# Altium integrated library a4402-ELE-CAD.IntLib: 46 symbols (part 1 of 2)
Pins are listed as number, name and electrical type; pins without a type are passive.

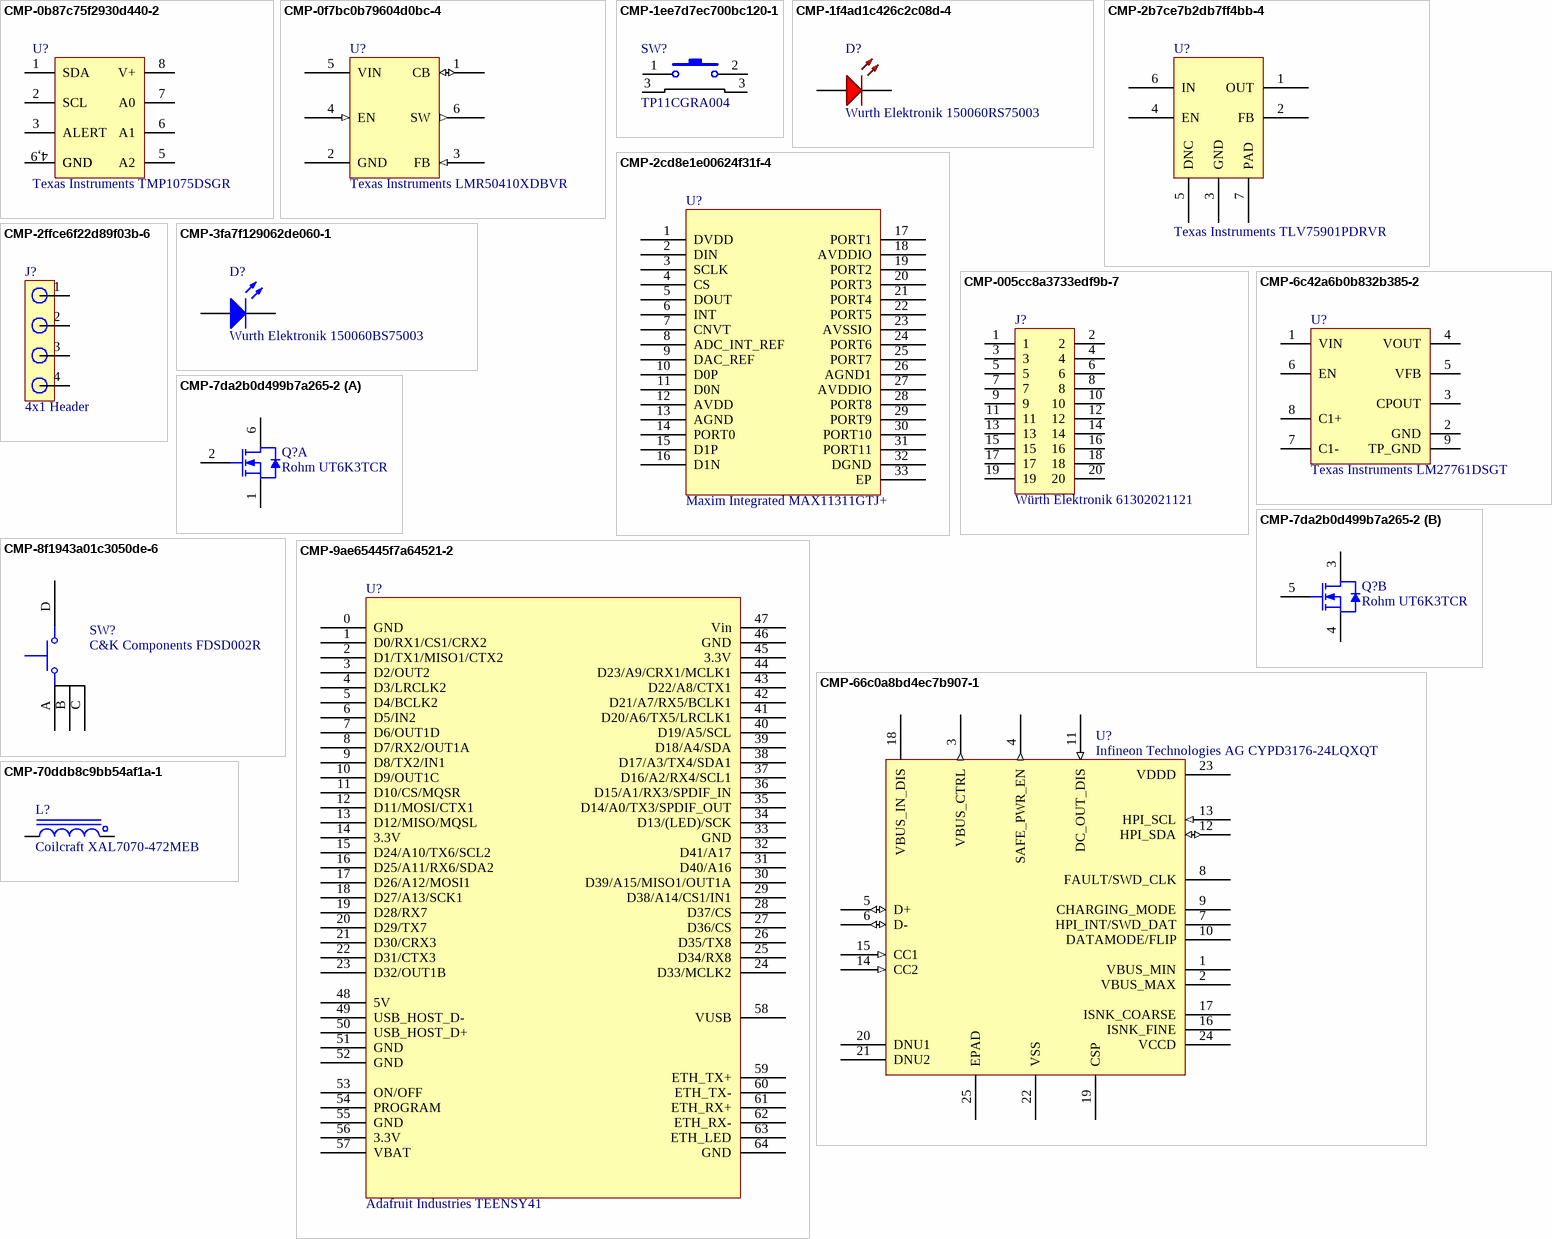
[diagram p0: symbols CMP-0b87c75f2930d440-2 to CMP-70ddb8c9bb54af1a-1]

## CMP-0b87c75f2930d440-2
designator U?, comment Texas Instruments TMP1075DSGR
High-accuracy upgrade to industry standard LM75 / TMP75 I2C temperature sensor 8-WSON -55 to 125; Case/Package: WSON; Footprint: PCB-22psa42mhiow8cw0mt2a-1; RoHS: Compliant; Octopart URL: https://octopart.com/tmp1075dsgr-texas+instruments-97650641; Lifecycle Status: Pre-Release; Manufacturer Part Number: TMP1075DSGR; OctopartID: 0b87c75f2930d440; Number of Pins: 8
footprint PCB-22psa42mhiow8cw0mt2a-1 (Footprint - Texas Instruments TMP1075DSGR)
pins: 1 SDA, 2 SCL, 3 ALERT, 4 GND (power), 5 A2, 6 A1, 7 A0, 8 V+ (power) "1.7...5.5V", 9 GND (power)
text: 4,9

## CMP-0f7bc0b79604d0bc-4
designator U?, comment Texas Instruments LMR50410XDBVR
SIMPLE SWITCHER 4-V to 36-V, 1-A synchronous step-down converter 6-SOT-23 -40 to 150; Number of Outputs: 1; Switching Frequency: 700kHz (typ); Topology: Buck Converter; Output Current: 1.0A; Lead-Free Status: Lead Free; Input Voltage: 4.0V to 36.0V; Output Voltage: Adjustable (SW to GND: -0.3V to VIN+0.3V); case/package: SOT-23-6 DBV Package; Number of Pins: 6; Mounting Style: Surface Mount; Manufacturer Part Number: LMR50410XDBVR; Operating Temperature (Junction): -40°C to 150°C; Octopart URL: https://octopart.com/lmr50410xdbvr-texas+instruments-113687577; OctopartID: 0f7bc0b79604d0bc; Footprint: PCB-b726so6zuq7w9f75ocqz-1; Lifecycle Status: Not Listed by Manufacturer
footprint PCB-b726so6zuq7w9f75ocqz-1 (Footprint - Texas Instruments LMR50410XDBVR)
pins: 1 CB (io), 2 GND (power), 3 FB (in), 4 EN (in), 5 VIN (power), 6 SW (out)

## CMP-1ee7d7ec700bc120-1
designator SW?, comment TP11CGRA004
Switch, Pushbutton, Thru-Hole Mount, SPST, PC Mount, 1000 V (RMS) (Min.); Contact Resistance: 20.0 mΩ (max); ELV Compliant: Non-Compliant; Lead-Free Status: Contains Lead; Size-Width: 5.08 mm; Octopart URL: https://octopart.com/tp11cgra0-te+connectivity+%2F+alcoswitch-84874; Lifecycle Status: Active; Contacts Type: SPST; OctopartID: 1ee7d7ec700bc120; RoHS: Non-Compliant; Packaging: Bulk; Footprint: PCB-kxc5zoxy62rh6gxl0cji-1; Orientation: Right Angle; Size-Length: 8.13 mm; Manufacturer Part Number: TP11CGRA004; Contact Plating: Gold over Nickel; Operating Temperature: 65.0 °C (max); Contact Material: Copper Alloy; Mounting Style: Through Hole
footprint PCB-kxc5zoxy62rh6gxl0cji-1 (Footprint - TE Connectivity / Alcoswitch TP11CGRA0)
pins: 1, 2, 3, 3

## CMP-1f4ad1c426c2c08d-4
designator D?, comment Wurth Elektronik 150060RS75003
SMT Mono-color Chip Led Watercle; OctopartID: 1f4ad1c426c2c08d; Manufacturer Part Number: 150060RS75003; Octopart Url: https://octopart.com/150060rs75003-wurth+elektronik-126098670
footprint Wurth Elektronik 150060RS75003-Footprint-1
pins: 1 A, 2 K

## CMP-2b7ce7b2db7ff4bb-4
designator U?, comment Texas Instruments TLV75901PDRVR
LDO Regulator Pos 0.55V to 5.5V 1A 6-Pin WSON EP T/R; Dropout Voltage: 190 mV; Number of Regulated Outputs: 1; Output Capacitor Type: Ceramic; Quiescent Current: 25.0 µA; OctopartID: 2b7ce7b2db7ff4bb; Manufacturer Part Number: TLV75901PDRVR; Footprint: PCB-6kp9dl1mk9yrlugndkjx-1; RoHS: Compliant; Octopart URL: https://octopart.com/tlv75901pdrvr-texas+instruments-96785765; Number of Pins: 6; Lifecycle Status: Pre-Release; Case/Package: WSON; Operating Temperature: -40.0 °C to 125 °C
footprint PCB-ude52gq66msu1251nhm5-1 (Texas Intrusment LP5912 - 6Pin SON (Small Outline No-lead))
pins: 1 OUT, 2 FB, 3 GND, 4 EN, 5 DNC, 6 IN, 7 PAD

## CMP-2cd8e1e00624f31f-4
designator U?, comment Maxim Integrated MAX11311GTJ+
12-channel 12-Bit ADC and 12-Bit DAC, Analog PIXI, 12-Port Programmable Mixed-Signal I/O; Channels: 12; Lead-Free Status: Lead Free; Sample Rate: 400 kHz; Range Options: 0 to 2.5V, ±5V, 0 to +10V, -10V; Supply Voltage (DC): 4.75 V (max), 5.25 V (min); Manufacturer Part Number: MAX11311GTJ+; Lifecycle Status: Not Listed by Manufacturer; Octopart URL: http://octopart.com/max11311gtj%2B-maxim+integrated-70389658; RoHS: Compliant; Number of Bits: 12; OctopartID: 2cd8e1e00624f31f; Package: TQFN-32; Resolution: 12-bit; Footprint: PCB-s1hzzxkmij8s4b201del-1
footprint PCB-s1hzzxkmij8s4b201del-1
pins: 1 DVDD, 2 DIN, 3 SCLK, 4 CS, 5 DOUT, 6 INT, 7 CNVT, 8 ADC_INT_REF, 9 DAC_REF, 10 D0P, 11 D0N, 12 AVDD, 13 AGND, 14 PORT0, 15 D1P, 16 D1N, 17 PORT1, 18 AVDDIO, 19 PORT2, 20 PORT3, 21 PORT4, 22 PORT5, 23 AVSSIO, 24 PORT6, 25 PORT7, 26 AGND1, 27 AVDDIO, 28 PORT8, 29 PORT9, 30 PORT10, 31 PORT11, 32 DGND, 33 EP

## CMP-2ffce6f22d89f03b-6
designator J?, comment 4x1 Header
2.54mm 100mil header; Manufacturer Part Number: TSW-102-07-G-D; Number of Positions: 4; Gender: Male; Lead-Free Status: Lead Free; OctopartID: 2ffce6f22d89f03b; Pin Pitch: 2.54 mm; REACH SVHC Compliance: No SVHC; Packaging: Bulk; Color: Black; Footprint: PCB-frzzw7wnfsmgwg7mpl31-1; Octopart URL: https://octopart.com/tsw-102-07-g-d-samtec-272147; Contact Plating: Gold; Size-Width: 5.08 mm; Mounting Style: Through Hole; Size-Height: 2.54 mm; Housing Color: Black; Size-Length: 5.08 mm; Operating Temperature: 125 °C (max); Number of Contacts: 4; Housing Material: Plastic; RoHS: Compliant; Contact Material: Phosphor Bronze; Number of Rows: 2
footprint PCB-frzzw7wnfsmgwg7mpl31-1
pins: 1, 2, 3, 4

## CMP-3fa7f129062de060-1
designator D?, comment Wurth Elektronik 150060BS75003
SMT Mono-Color Chip LED Waterclear Advance; Color: Blue; Voltage: 3.2V; Forward Current: 20mA; Octopart Url: https://octopart.com/150060bs75003-wurth+elektronik-126098668; Manufacturer Part Number: 150060BS75003; OctopartID: 3fa7f129062de060
footprint 0603D_C
pins: 1 A, 2 K

## CMP-005cc8a3733edf9b-7
designator J?, comment Würth Elektronik 61302021121
THT Vertical Pin Header WR-PHD, Pitch 2.54 mm, Dual Row, 20 pins; Current Rating: 3.00 A; Dielectric Withstanding Voltage: 500 V; Pin Pitch: 2.54 mm; Operating Voltage: 250 V; Number of Contacts: 20; Contact Resistance: 20.0 mΩ; Gender: Male; Contact Material: Copper; Footprint: PCB-005cc8a3733edf9b-1; Mounting Style: Through Hole; Color: Black; Contact Plating: Gold; REACH SVHC Compliance: No SVHC; RoHS: Compliant; Octopart URL: https://octopart.com/61302021121-w%C3%BCrth+elektronik-32855556; Packaging: Bag; Orientation: Vertical; OctopartID: 005cc8a3733edf9b; Number of Pins: 20; Operating Temperature: -40.0 °C (min); Manufacturer Part Number: 61302021121
footprint PCB-nk6cd1c3p7lqby8wsdwb-1 (CONN HEADER 20POS .100 STR TIN)
pins: 1, 2, 3, 4, 5, 6, 7, 8, 9, 10, 11, 12, 13, 14, 15, 16, 17, 18, 19, 20

## CMP-6c42a6b0b832b385-2
designator U?, comment Texas Instruments LM27761DSGT
Low-Noise regulated Switched Capacitor Voltage Inverter 8-WSON -40 to 85; Quiescent Current: 370 µA; Lead-Free Status: Lead Free; Output Voltage: -5.00 V (min); Number of Regulated Outputs: 1; Output Current: 250 mA; RoHS: Compliant; Mounting Style: Surface Mount; Number of Pins: 8; Manufacturer Part Number: LM27761DSGT; Octopart URL: http://octopart.com/lm27761dsgt-texas+instruments-66646294; Packaging: Cut Tape (CT); Lifecycle Status: Active; Footprint: PCB-j228smfc5dpw7all0w6z-1; OctopartID: 6c42a6b0b832b385; Case/Package: WSON
footprint PCB-4n89rivuw3spi8alca02-1 (Footprint - Texas Instruments LM27761DSGT)
footprint PCB-j228smfc5dpw7all0w6z-1 (Footprint - Texas Instruments LM27761DSGT)
pins: 1 VIN, 2 GND, 3 CPOUT, 4 VOUT, 5 VFB, 6 EN, 7 C1-, 8 C1+, 9 TP_GND

## CMP-7da2b0d499b7a265-2
designator Q?, comment Rohm UT6K3TCR
On a Reel of 3000, Dual N-Channel MOSFET, 5.5 A, 30 V, 8-Pin DFN ROHM UT6K3TCR; Polarity: Dual N-Channel; Footprint: PCB-qj1nrqbgj5udp5r3frdj-1; RoHS: Compliant; OctopartID: 7da2b0d499b7a265; Manufacturer Part Number: UT6K3TCR; Operating Temperature: 150 °C (max); Octopart URL: https://octopart.com/ut6k3tcr-rohm-75284851
footprint DFN2020-8D (SON, 6-Leads, Body 2.1x2.1mm, Pitch 0.65mm, 2X Thermal Pad 0.67x1 mm, IPC Medium Density)
part A pins: 1 S "source", 2 G "gate", 6 D "drain", 7 D hidden to 6
part B pins: 3 D "drain", 4 S "source", 5 G "gate", 8 D hidden to 3

## CMP-8f1943a01c3050de-6
designator SW?, comment C&K Components FDSD002R
Switch Detector Side Actuated OFF-MOM 10mA 5VDC 0.39N SPST-NO Flat Terminal Surface Mount T/R; Lead-Free Status: Lead Free; RoHS: Compliant; Octopart URL: https://octopart.com/fdsd002r-c%26k+components-95663695; Footprint: PCB-eidm0z1z6we3mnuhu73s-3; Manufacturer Part Number: FDSD002R; OctopartID: 8f1943a01c3050de
footprint FDSD002r (Footprint - C&K Components FDSD002R)
pins: A, B, C, D

## CMP-9ae65445f7a64521-2
designator U?, comment Adafruit Industries TEENSY41
PJRC Teensy 4.1 Development Board; OctopartID: 9ae65445f7a64521; Manufacturer Part Number: TEENSY41; Octopart Url: https://octopart.com/teensy41-adafruit+industries-128534566
footprint Adafruit Industries TEENSY41-Footprint-1
pins: 0 GND, 1 D0/RX1/CS1/CRX2, 2 D1/TX1/MISO1/CTX2, 3 D2/OUT2, 4 D3/LRCLK2, 5 D4/BCLK2, 6 D5/IN2, 7 D6/OUT1D, 8 D7/RX2/OUT1A, 9 D8/TX2/IN1, 10 D9/OUT1C, 11 D10/CS/MQSR, 12 D11/MOSI/CTX1, 13 D12/MISO/MQSL, 14 3.3V, 15 D24/A10/TX6/SCL2, 16 D25/A11/RX6/SDA2, 17 D26/A12/MOSI1, 18 D27/A13/SCK1, 19 D28/RX7, 20 D29/TX7, 21 D30/CRX3, 22 D31/CTX3, 23 D32/OUT1B, 24 D33/MCLK2, 25 D34/RX8, 26 D35/TX8, 27 D36/CS, 28 D37/CS, 29 D38/A14/CS1/IN1, 30 D39/A15/MISO1/OUT1A, 31 D40/A16, 32 D41/A17, 33 GND, 34 D13/(LED)/SCK, 35 D14/A0/TX3/SPDIF_OUT, 36 D15/A1/RX3/SPDIF_IN, 37 D16/A2/RX4/SCL1, 38 D17/A3/TX4/SDA1, 39 D18/A4/SDA, 40 D19/A5/SCL, 41 D20/A6/TX5/LRCLK1, 42 D21/A7/RX5/BCLK1, 43 D22/A8/CTX1, 44 D23/A9/CRX1/MCLK1, 45 3.3V, 46 GND, 47 Vin, 48 5V, 49 USB_HOST_D-, 50 USB_HOST_D+, 51 GND, 52 GND, 53 ON/OFF, 54 PROGRAM, 55 GND, 56 3.3V, 57 VBAT, 58 VUSB, 59 ETH_TX+, 60 ETH_TX-, 61 ETH_RX+, 62 ETH_RX-, 63 ETH_LED, 64 GND

## CMP-66c0a8bd4ec7b907-1
designator U?, comment Infineon Technologies AG CYPD3176-24LQXQT
Usb Type-C Pd Cntrl, -40 To 105Deg C Rohs Compliant: Yes; Manufacturer Part Number: CYPD3176-24LQXQT; Octopart Url: https://octopart.com/cypd3176-24lqxqt-infineon+technologies+ag-125242721; OctopartID: 66c0a8bd4ec7b907
footprint QFN-24_N (QFN, 24-Leads, Body 4x4mm, Pitch 0.5mm, Thermal Pad 2.7x2.7mm, IPC Medium Density)
pins: 1 VBUS_MIN, 2 VBUS_MAX, 3 VBUS_CTRL (out), 4 SAFE_PWR_EN (out), 5 D+ (io), 6 D- (io), 7 HPI_INT/SWD_DAT, 8 FAULT/SWD_CLK, 9 CHARGING_MODE, 10 DATAMODE/FLIP, 11 DC_OUT_DIS (in), 12 HPI_SDA (io), 13 HPI_SCL (in), 14 CC2 (in), 15 CC1 (in), 16 ISNK_FINE, 17 ISNK_COARSE, 18 VBUS_IN_DIS, 19 CSP, 20 DNU1, 21 DNU2, 22 VSS (power), 23 VDDD (power), 24 VCCD (power), 25 EPAD (power)

## CMP-70ddb8c9bb54af1a-1
designator L?, comment Coilcraft XAL7070-472MEB
Power inductor, shielded, 20% tol, SMT, RoHS, halogen f; Lead-Free Status: Contains Lead; Manufacturer Part Number: XAL7070-472MEB; Mounting Style: Surface Mount; Lifecycle Status: Active; Octopart Url: https://octopart.com/xal7070-472meb-coilcraft-18804463; RoHS: Compliant; OctopartID: 70ddb8c9bb54af1a; Packaging: Reel
footprint PCB-mw0ri1kelkujqd8k45jk-1
pins: 1, 2

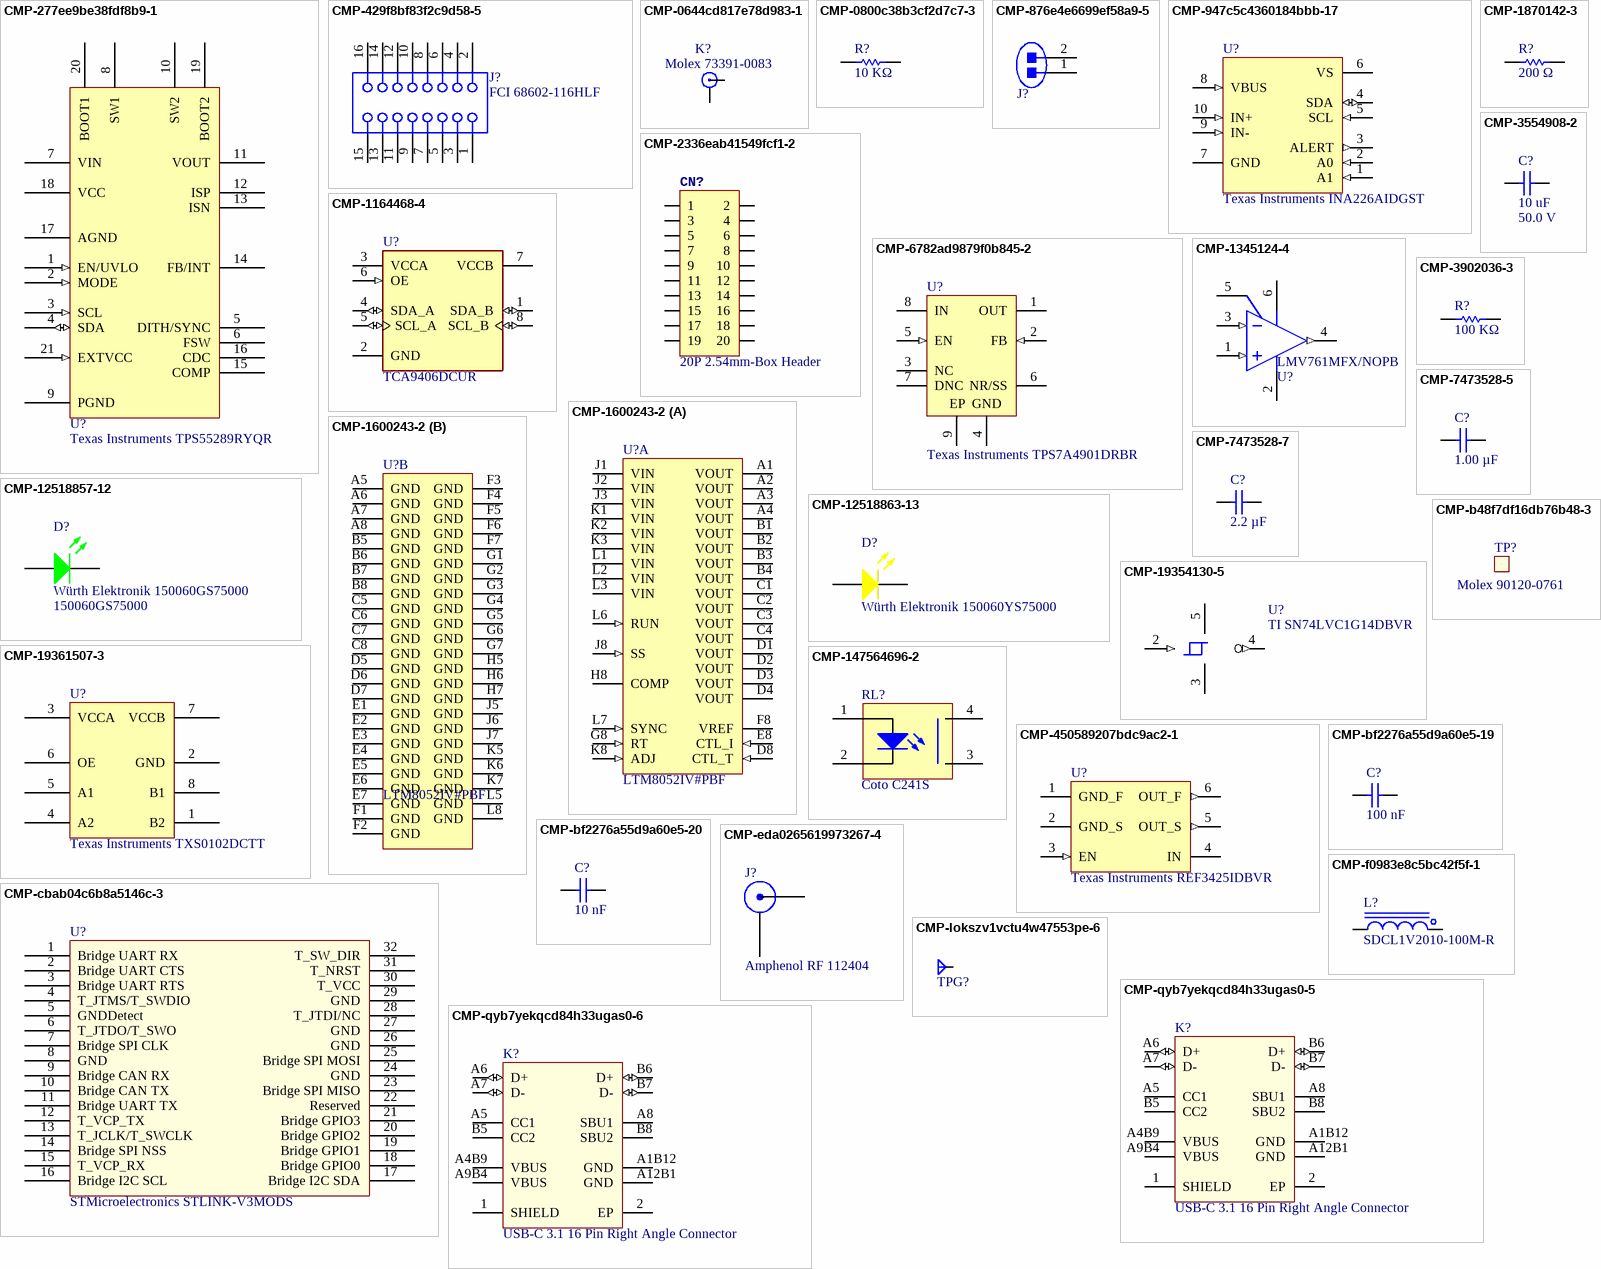
[diagram p1: symbols CMP-277ee9be38fdf8b9-1 to CMP-qyb7yekqcd84h33ugas0-6]

## CMP-277ee9be38fdf8b9-1
designator U?, comment Texas Instruments TPS55289RYQR
30-V 8-A buck-boost converter with I²C interface 21-VQFN-HR -40 to 125; Octopart Url: https://octopart.com/tps55289ryqr-texas+instruments-130693861; Manufacturer Part Number: TPS55289RYQR; Lifecycle Status: Not Listed by Manufacturer; OctopartID: 277ee9be38fdf8b9
footprint DSG8-1600X900TP (SON, 8-Leads, Body 2x2mm, Pitch 0.5mm, Thermal Pad 1.6x0.9mm, TI Recommended)
pins: 1 EN/UVLO (in), 2 MODE (in), 3 SCL (in), 4 SDA (io), 5 DITH/SYNC, 6 FSW, 7 VIN (power), 8 SW1 (power), 9 PGND (power), 10 SW2 (power), 11 VOUT (power), 12 ISP, 13 ISN, 14 FB/INT, 15 COMP, 16 CDC, 17 AGND (power), 18 VCC (power), 19 BOOT2 (power), 20 BOOT1 (power), 21 EXTVCC (in)

## CMP-429f8bf83f2c9d58-5
designator J?, comment FCI 68602-116HLF
Conn Unshrouded Header HDR 16 POS 2.54mm Solder ST Thru-Hole Poly Bag; Number of Contacts: 16; Gender: Male; Octopart URL: http://octopart.com/68602-116hlf-fci-7166165; Pin Pitch: 2.54 mm; Packaging: Bulk; Contact Plating: Gold; Footprint: PCB-8dkjn6b77nx2tsqv24pv-3; OctopartID: 429f8bf83f2c9d58; Manufacturer Part Number: 68602-116HLF; Contact Material: Phosphor Bronze; RoHS: Compliant; Number of Rows: 2; Mounting Style: Through Hole
footprint HEADER8X2 (Footprint - FCI 68602-116HLF)
pins: 1, 2, 3, 4, 5, 6, 7, 8, 9, 10, 11, 12, 13, 14, 15, 16

## CMP-0644cd817e78d983-1
designator K?, comment Molex 73391-0083
RF Connectors / Coaxial Connectors SMA ST JCK-REC 4HF CUP; Gender: Female; Contact Plating: Gold; Octopart URL: https://octopart.com/73391-0083-molex-47144282; Orientation: Right Angle; OctopartID: 0644cd817e78d983; RoHS: Compliant; Contact Material: Beryllium Copper; Manufacturer Part Number: 73391-0083; Footprint: PCB-bfde39zrvmm7lhgxtykn-1; Mounting Style: Solder, PCB; Lifecycle Status: Not Listed by Manufacturer
footprint PCB-bfde39zrvmm7lhgxtykn-1 (Footprint - Molex 73391-0083)
pins: 1, 2

## CMP-0800c38b3cf2d7c7-3
designator R?, comment Resistance: 10 KΩ  (hidden comment: Generic RES 0603)
Generic RES 0603, =Resistance+','+Tolerance+','+Case; Manufacturer Part Number: MCT06030C1002FP500; Case/Package (SI): 1608; Lead-Free Status: Lead Free; Power Rating: 63.0 mW; Voltage: 50V; ELV Compliant: Compliant; Tolerance: ±1%; Temperature Coefficient: -50.0 ppm/°C to 50.0 ppm/°C; Octopart URL: TBD; Number of Pins: 2; Mounting Style: Surface Mount; Packaging: Tape & Reel (TR); Lifecycle Status: Active; RoHS: Compliant; Case: 0603; Operating Temperature: -55.0 °C to 125 °C; REACH SVHC Compliance: No SVHC; Footprint: PCB-0002-00066-3; OctopartID: a8e96364fc37772e
footprint RESC1608X55X30ML15T15
footprint RESC1608X55X30NL15T15
footprint RESC1608X55X30LL15T15
pins: 1, 2
1 alternate drawing of the same symbol

## CMP-876e4e6699ef58a9-5
designator J?, comment TE Connectivity / AMP 5-146280-2  (value not drawn)
2 Positions Header, Unshrouded, Breakaway Connector 0.100" (2.54mm) Through Hole Gold; Vendor Part Number: A121480-ND; Manufacturer: TE Connectivity AMP Connectors; Vendor: Digikey; Number of Positions: 2; Contact Type: Male Pin; Octopart URL: http://octopart.com/5-146280-2-te+connectivity+%2F+amp-39436426; Contact Finish: Gold; HelpURL: http://www.te.com/commerce/DocumentDelivery/DDEController?Action=srchrtrv&DocNm=146280&DocType=Customer+Drawing&DocLang=English; Cost: 0.43; Contact Mating Length: 0.230" (5.84mm); Mounting Type: Through Hole; Family: Rectangular Connectors - Headers, Male Pins; Connector Type: Header, Unshrouded, Breakaway; Category: Connectors, Interconnects; Number of Rows: 1; Pitch: Header, Unshrouded, Breakaway; Manufacturer Part Number: 5-146280-2; Contact Finish Thickness: 15µin (0.38µm); OctopartID: 3545fe16d0a9ea82
footprint PCB-nx47vqovjjduu8dkc1uz-1 (Footprint - TE Connectivity / AMP 5-146280-2)
pins: 1, 2

## CMP-947c5c4360184bbb-17
designator U?, comment Texas Instruments INA226AIDGST
36-V, Bi-Directional, Ultra-High Accuracy, Low-/High-Side, I2C Out Current/Power Monitor w/ Alert 10-VSSOP -40 to 125; Manufacturer Part Number: INA226AIDGST
footprint TSSOP10
pins: 1 A1 (in), 2 A0 (in), 3 ALERT (out), 4 SDA (io), 5 SCL (in), 6 VS, 7 GND, 8 VBUS (in), 9 IN- (in), 10 IN+ (in)

## CMP-2336eab41549fcf1-2
designator CN?, comment 20P 2.54mm-Box Header
Male Box Header WR-BHD, THT, Vertical, pitch 2.54 mm, 20 pins; Manufacturer Part Number: 61202021621; Number of Contacts: 20; Dielectric Withstanding Voltage: 500 V; Current Rating: 3.00 A; Pin Pitch: 2.54 mm; Contact Resistance: 20.0 mΩ; Operating Voltage: 250 V; Insulation Resistance: 1.00 GΩ; Flammability Rating: UL 94 V-0; REACH SVHC Compliance: No SVHC; Footprint: PCB-h3ow9p0wpqltbs651onh-1; Color: Black; RoHS: Compliant; Mounting Style: Through Hole; Number of Pins: 20; Contact Plating: Gold; Packaging: Tray; OctopartID: 2336eab41549fcf1; Orientation: Vertical; Contact Material: Copper; Operating Temperature: -40.0 °C (min); Octopart URL: https://octopart.com/61202021621-w%C3%BCrth+elektronik-8917785; Gender: Male
footprint PCB-h3ow9p0wpqltbs651onh-1 (Footprint - 20P 2.54mm-Box Header)
pins: 1, 2, 3, 4, 5, 6, 7, 8, 9, 10, 11, 12, 13, 14, 15, 16, 17, 18, 19, 20

## CMP-6782ad9879f0b845-2
designator U?, comment Texas Instruments TPS7A4901DRBR
IC REG LDO ADJ 0.15A 8SON / LDO Regulator Pos 1.194V to 33V 0.15A 8-Pin VSON EP T/R; Number of Regulated Outputs: 1; Quiescent Current: 800.0 µA; Dropout Voltage: 300 mV; Output Capacitor Type: Ceramic; Lead-Free Status: RoHS & Green; RoHS: Compliant; Manufacturer Part Number: TPS7A4901DRBR; Packaging: Tape & Reel (TR); Octopart Url: https://octopart.com/tps7a4901drbr-texas+instruments-51395348; Number of Pins: 8; Operating Temperature: -40.0 °C to 125 °C; OctopartID: 6782ad9879f0b845; Lifecycle Status: Pre-Release; Mounting Style: Surface Mount
footprint TI-DRB8-1750X1500TP_V (SON, 8-Leads, Body 3x3mm, Pitch 0.65mm, Thermal Pad 1.50 x 3.8mm)
pins: 1 OUT (power) "Regulator output. A capacitor >= 2.2uF must be tied from this pin to ground to assure stability.", 2 FB (in) "This pin is the input to the control-loop error amplifier. It is used to set the output voltage of the device", 3 NC "Not internally connected. This pin must either be left open or tied to GND.", 4 GND (power) "Ground", 5 EN (in), 6 NR/SS "Noise reduction pin. Connecting an external capacitor to this pin bypasses noise generated by the internal bandgap. This capacitor allows RMS noise to be reduced to very low levels and also controls the soft-start function.", 7 DNC "DO NOT CONNECT. Do not route this pin to any electrical net, not even GND or IN.", 8 IN (power) "Input supply", 9 EP (power) "Must either be left open or tied to GND. Solder to printed circuit board (PCB) plane to enhance thermal performance."

## CMP-1164468-4
designator U?, comment TCA9406DCUR
TCA9406 Dual Bidirectional 1-MHz I2C-BUS and SMBus Voltage Level-Translator, 1.65 to 3.6 V, -40 to 85 degC, 8-pin US8 (DCU), Green (RoHS & no Sb/Br); Lead-Free Status: Lead Free; Number of Outputs: 2; Manufacturer Part Number: TCA9406DCUR; Packaging: Cut Tape (CT); Lifecycle Status: Active; OctopartID: 2214ea378f96fdd3; REACH SVHC Compliance: No SVHC; Octopart Url: https://octopart.com/tca9406dcur-texas+instruments-19499236; RoHS: Compliant; Number of Pins: 8
footprint DCU8_L (TSSOP, 8-Leads, Body 2x2.3mm, Pitch 0.5mm, IPC High Density)
footprint DCU8_M (TSSOP, 8-Leads, Body 2x2.3mm, Pitch 0.5mm, IPC Low Density)
footprint DCU8_N (TSSOP, 8-Leads, Body 2x2.3mm, Pitch 0.5mm, IPC Medium Density)
pins: 1 SDA_B (io) "Input/output B. Referenced to VCCB. Allow I2C_SDA configured to 2.5V/3.3V/5V", 2 GND (power) "Ground", 3 VCCA (power) "A-port supply voltage.1.65=< VCCA =< 3.6 V and VCCA =< VCCB. Configuration for SDA_A,SCL_A and OE", 4 SDA_A (io) "Input/output A. Referenced to VCCA. Allows I2C_SDA configured to 1.8V, 2.5V, 3.3V", 5 SCL_A (io) "Input/output A. Referenced to VCCA. Allows I2C_SCL configured to 1.8V, 2.5V, 3.3V", 6 OE (in) "Output enable (active High). Pull OE low to place all outputs in 3-state mode.Referenced to VCCA. Pull OE to LOW to place all outputs in 3-state mode with 3.6V input tolerance.", 7 VCCB (power) "B-port supply voltage. 2.3 V =< VCCB =<5.5 V for SDA_B, SCL_B", 8 SCL_B (io) "Input/output B. Referenced to VCCB. Allow I2C_SCL configured to 2.5V/3.3V/5V"

## CMP-1345124-4
designator U?, comment LMV761MFX/NOPB
Low Voltage, Precision Comparator with Push-Pull Output, 6-pin SOT-23, Pb-Free; Manufacturer: Texas Instruments; Output Current: 0.04 A; Number of Channels: 1; Lead-Free Status: Lead Free; RoHS: Compliant; OctopartID: 23bbebcbaf88fc7c; Case/Package: SOT; Mounting Style: Surface Mount; Octopart Url: https://octopart.com/lmv761mfx%2Fnopb-texas+instruments-24815957; DigiKey: https://www.digikey.com/en/products/detail/texas-instruments/LMV761MFX-NOPB/1872382; Lifecycle Status: Active; Manufacturer Part Number: LMV761MFX/NOPB
footprint MF06A_N (SOT23, 6-Leads, Body 2.9x1.6mm, Pitch 0.95mm, Lead Span 2.8mm, IPC Medium Density)
pins: 1 IN+ (in), 2 V- (power), 3 IN- (in), 4 OUT (out), 5 ~{SD}, 6 V+ (power)

## CMP-1600243-2
designator U?, comment LTM8052IV#PBF
36 VIN, 5 A, 2-Quadrant CVCC Step-Down uModule Regulator, 81-pin LGA, -40 to 125 degC, Pb-Free, Tray; Number of Outputs: 1; Output Current: 5.0 A; Output Voltage: 24.0 V; Manufacturer Part Number: LTM8052IV#PBF; Mounting Style: Surface Mount; Number of Pins: 81; Octopart Url: https://octopart.com/ltm8052iv%23pbf-linear+technology-21041704; OctopartID: cd35057efa7b12f2; Packaging: Cut Tape (CT); REACH SVHC Compliance: No SVHC; RoHS: Compliant
footprint LT-LGA-81-15000X11250X2820_V (LGA, 81-Leads, Body 15x11.25mm, Pitch 1.27mm)
part A pins: A1 VOUT (power) "Power Output Pins. Apply the output filter capacitor and the output load between these pins and GND pins. When reverse current is being driven into the LTM8052/LTM8052A’s output by the load, the energy is delivered bac(See Datasheet)", A2 VOUT (power) "Power Output Pins. Apply the output filter capacitor and the output load between these pins and GND pins. When reverse current is being driven into the LTM8052/LTM8052A’s output by the load, the energy is delivered bac(See Datasheet)", A3 VOUT (power) "Power Output Pins. Apply the output filter capacitor and the output load between these pins and GND pins. When reverse current is being driven into the LTM8052/LTM8052A’s output by the load, the energy is delivered bac(See Datasheet)", A4 VOUT (power) "Power Output Pins. Apply the output filter capacitor and the output load between these pins and GND pins. When reverse current is being driven into the LTM8052/LTM8052A’s output by the load, the energy is delivered bac(See Datasheet)", B1 VOUT (power) "Power Output Pins. Apply the output filter capacitor and the output load between these pins and GND pins. When reverse current is being driven into the LTM8052/LTM8052A’s output by the load, the energy is delivered bac(See Datasheet)", B2 VOUT (power) "Power Output Pins. Apply the output filter capacitor and the output load between these pins and GND pins. When reverse current is being driven into the LTM8052/LTM8052A’s output by the load, the energy is delivered bac(See Datasheet)", B3 VOUT (power) "Power Output Pins. Apply the output filter capacitor and the output load between these pins and GND pins. When reverse current is being driven into the LTM8052/LTM8052A’s output by the load, the energy is delivered bac(See Datasheet)", B4 VOUT (power) "Power Output Pins. Apply the output filter capacitor and the output load between these pins and GND pins. When reverse current is being driven into the LTM8052/LTM8052A’s output by the load, the energy is delivered bac(See Datasheet)", C1 VOUT (power) "Power Output Pins. Apply the output filter capacitor and the output load between these pins and GND pins. When reverse current is being driven into the LTM8052/LTM8052A’s output by the load, the energy is delivered bac(See Datasheet)", C2 VOUT (power) "Power Output Pins. Apply the output filter capacitor and the output load between these pins and GND pins. When reverse current is being driven into the LTM8052/LTM8052A’s output by the load, the energy is delivered bac(See Datasheet)", C3 VOUT (power) "Power Output Pins. Apply the output filter capacitor and the output load between these pins and GND pins. When reverse current is being driven into the LTM8052/LTM8052A’s output by the load, the energy is delivered bac(See Datasheet)", C4 VOUT (power) "Power Output Pins. Apply the output filter capacitor and the output load between these pins and GND pins. When reverse current is being driven into the LTM8052/LTM8052A’s output by the load, the energy is delivered bac(See Datasheet)", D1 VOUT (power) "Power Output Pins. Apply the output filter capacitor and the output load between these pins and GND pins. When reverse current is being driven into the LTM8052/LTM8052A’s output by the load, the energy is delivered bac(See Datasheet)", D2 VOUT (power) "Power Output Pins. Apply the output filter capacitor and the output load between these pins and GND pins. When reverse current is being driven into the LTM8052/LTM8052A’s output by the load, the energy is delivered bac(See Datasheet)", D3 VOUT (power) "Power Output Pins. Apply the output filter capacitor and the output load between these pins and GND pins. When reverse current is being driven into the LTM8052/LTM8052A’s output by the load, the energy is delivered bac(See Datasheet)", D4 VOUT (power) "Power Output Pins. Apply the output filter capacitor and the output load between these pins and GND pins. When reverse current is being driven into the LTM8052/LTM8052A’s output by the load, the energy is delivered bac(See Datasheet)", D8 CTL_T (in) "Connect a resistor/NTCthermistornetwork to the CTL_T pin to reduce the maximum regulated output current of the LTM8052/LTM8052A in response to temperature. The maximum control voltage is 1.5V. If this function is not used, (See Datasheet)", E8 CTL_I (in) "The CTL_I pin reduces the maximum regulated output current of the LTM8052/LTM8052A. The maximum control voltage is 1.5V. If this function is not used, tie this pin to VREF.", F8 VREF "Buffered 2V Reference Capable of 0.5mA Drive. It is valid when VIN > 6V and RUN is active high.", G8 RT (in) "The RT pin is used to program the switching frequency of the LTM8052/LTM8052A by connecting a resistorfromthispintoground. TheApplicationsInformationsection of the data sheet includes a table to determine the (See Datasheet)", H8 COMP "Compensation Pin. This pin is generally not used. The LTM8052/LTM8052A is internally compensated, but some rare situations may arise that require a modification to the control loop. This pin connects directly (See Datasheet)", J1 VIN (power) "The VIN pins supply current to the LTM8052/ LTM8052A’s internal regulator and to the internal power  switches. This pin must be locally bypassed with an external, low ESR capacitor; see Table 1 for recommended  values.", J2 VIN (power) "The VIN pins supply current to the LTM8052/ LTM8052A’s internal regulator and to the internal power  switches. This pin must be locally bypassed with an external, low ESR capacitor; see Table 1 for recommended  values.", J3 VIN (power) "The VIN pins supply current to the LTM8052/ LTM8052A’s internal regulator and to the internal power  switches. This pin must be locally bypassed with an external, low ESR capacitor; see Table 1 for recommended  values.", J8 SS (in) "Soft-Start Pin. Place an external capacitor to ground to ramp the output voltage during start-up conditions. The soft-start pin has an 11uA charging current.", K1 VIN (power) "The VIN pins supply current to the LTM8052/ LTM8052A’s internal regulator and to the internal power  switches. This pin must be locally bypassed with an external, low ESR capacitor; see Table 1 for recommended  values.", K2 VIN (power) "The VIN pins supply current to the LTM8052/ LTM8052A’s internal regulator and to the internal power  switches. This pin must be locally bypassed with an external, low ESR capacitor; see Table 1 for recommended  values.", K3 VIN (power) "The VIN pins supply current to the LTM8052/ LTM8052A’s internal regulator and to the internal power  switches. This pin must be locally bypassed with an external, low ESR capacitor; see Table 1 for recommended  values.", K8 ADJ (in) "The LTM8052/LTM8052A regulates its ADJ pin to 1.19V. Connect the adjust resistor from this pin to ground.", L1 VIN (power) "The VIN pins supply current to the LTM8052/ LTM8052A’s internal regulator and to the internal power  switches. This pin must be locally bypassed with an external, low ESR capacitor; see Table 1 for recommended  values.", L2 VIN (power) "The VIN pins supply current to the LTM8052/ LTM8052A’s internal regulator and to the internal power  switches. This pin must be locally bypassed with an external, low ESR capacitor; see Table 1 for recommended  values.", L3 VIN (power) "The VIN pins supply current to the LTM8052/ LTM8052A’s internal regulator and to the internal power  switches. This pin must be locally bypassed with an external, low ESR capacitor; see Table 1 for recommended  values.", L6 RUN (in) "The RUN pin acts as an enable pin and turns on the internal circuitry. It may also be used to implement a precision UVLO. See the Applications Information section for details. The RUN pin is internally clamped, so it may be (See Datasheet)", L7 SYNC (in) "Frequency Synchronization Pin. This pin allows the switching frequency to be synchronized to an external clock. The RT resistor should be chosen to operate the internal clock at 20% lower than the SYNC pulse frequency. This (See Datasheet)"
part B pins: A5 GND (power) "Tie these GND pins to a local ground plane  below the LTM8052/LTM8052A and the circuit components. In most applications, the bulk of the heat flow out  of the LTM8052/LTM8052A is through these pads, so the  printed circuit (See Datasheet)", A6 GND (power) "Tie these GND pins to a local ground plane  below the LTM8052/LTM8052A and the circuit components. In most applications, the bulk of the heat flow out  of the LTM8052/LTM8052A is through these pads, so the  printed circuit (See Datasheet)", A7 GND (power) "Tie these GND pins to a local ground plane  below the LTM8052/LTM8052A and the circuit components. In most applications, the bulk of the heat flow out  of the LTM8052/LTM8052A is through these pads, so the  printed circuit (See Datasheet)", A8 GND (power) "Tie these GND pins to a local ground plane  below the LTM8052/LTM8052A and the circuit components. In most applications, the bulk of the heat flow out  of the LTM8052/LTM8052A is through these pads, so the  printed circuit (See Datasheet)", B5 GND (power) "Tie these GND pins to a local ground plane  below the LTM8052/LTM8052A and the circuit components. In most applications, the bulk of the heat flow out  of the LTM8052/LTM8052A is through these pads, so the  printed circuit (See Datasheet)", B6 GND (power) "Tie these GND pins to a local ground plane  below the LTM8052/LTM8052A and the circuit components. In most applications, the bulk of the heat flow out  of the LTM8052/LTM8052A is through these pads, so the  printed circuit (See Datasheet)", B7 GND (power) "Tie these GND pins to a local ground plane  below the LTM8052/LTM8052A and the circuit components. In most applications, the bulk of the heat flow out  of the LTM8052/LTM8052A is through these pads, so the  printed circuit (See Datasheet)", B8 GND (power) "Tie these GND pins to a local ground plane  below the LTM8052/LTM8052A and the circuit components. In most applications, the bulk of the heat flow out  of the LTM8052/LTM8052A is through these pads, so the  printed circuit (See Datasheet)", C5 GND (power) "Tie these GND pins to a local ground plane  below the LTM8052/LTM8052A and the circuit components. In most applications, the bulk of the heat flow out  of the LTM8052/LTM8052A is through these pads, so the  printed circuit (See Datasheet)", C6 GND (power) "Tie these GND pins to a local ground plane  below the LTM8052/LTM8052A and the circuit components. In most applications, the bulk of the heat flow out  of the LTM8052/LTM8052A is through these pads, so the  printed circuit (See Datasheet)", C7 GND (power) "Tie these GND pins to a local ground plane  below the LTM8052/LTM8052A and the circuit components. In most applications, the bulk of the heat flow out  of the LTM8052/LTM8052A is through these pads, so the  printed circuit (See Datasheet)", C8 GND (power) "Tie these GND pins to a local ground plane  below the LTM8052/LTM8052A and the circuit components. In most applications, the bulk of the heat flow out  of the LTM8052/LTM8052A is through these pads, so the  printed circuit (See Datasheet)", D5 GND (power) "Tie these GND pins to a local ground plane  below the LTM8052/LTM8052A and the circuit components. In most applications, the bulk of the heat flow out  of the LTM8052/LTM8052A is through these pads, so the  printed circuit (See Datasheet)", D6 GND (power) "Tie these GND pins to a local ground plane  below the LTM8052/LTM8052A and the circuit components. In most applications, the bulk of the heat flow out  of the LTM8052/LTM8052A is through these pads, so the  printed circuit (See Datasheet)", D7 GND (power) "Tie these GND pins to a local ground plane  below the LTM8052/LTM8052A and the circuit components. In most applications, the bulk of the heat flow out  of the LTM8052/LTM8052A is through these pads, so the  printed circuit (See Datasheet)", E1 GND (power) "Tie these GND pins to a local ground plane  below the LTM8052/LTM8052A and the circuit components. In most applications, the bulk of the heat flow out  of the LTM8052/LTM8052A is through these pads, so the  printed circuit (See Datasheet)", E2 GND (power) "Tie these GND pins to a local ground plane  below the LTM8052/LTM8052A and the circuit components. In most applications, the bulk of the heat flow out  of the LTM8052/LTM8052A is through these pads, so the  printed circuit (See Datasheet)", E3 GND (power) "Tie these GND pins to a local ground plane  below the LTM8052/LTM8052A and the circuit components. In most applications, the bulk of the heat flow out  of the LTM8052/LTM8052A is through these pads, so the  printed circuit (See Datasheet)", E4 GND (power) "Tie these GND pins to a local ground plane  below the LTM8052/LTM8052A and the circuit components. In most applications, the bulk of the heat flow out  of the LTM8052/LTM8052A is through these pads, so the  printed circuit (See Datasheet)", E5 GND (power) "Tie these GND pins to a local ground plane  below the LTM8052/LTM8052A and the circuit components. In most applications, the bulk of the heat flow out  of the LTM8052/LTM8052A is through these pads, so the  printed circuit (See Datasheet)", E6 GND (power) "Tie these GND pins to a local ground plane  below the LTM8052/LTM8052A and the circuit components. In most applications, the bulk of the heat flow out  of the LTM8052/LTM8052A is through these pads, so the  printed circuit (See Datasheet)", E7 GND (power) "Tie these GND pins to a local ground plane  below the LTM8052/LTM8052A and the circuit components. In most applications, the bulk of the heat flow out  of the LTM8052/LTM8052A is through these pads, so the  printed circuit (See Datasheet)", F1 GND (power) "Tie these GND pins to a local ground plane  below the LTM8052/LTM8052A and the circuit components. In most applications, the bulk of the heat flow out  of the LTM8052/LTM8052A is through these pads, so the  printed circuit (See Datasheet)", F2 GND (power) "Tie these GND pins to a local ground plane  below the LTM8052/LTM8052A and the circuit components. In most applications, the bulk of the heat flow out  of the LTM8052/LTM8052A is through these pads, so the  printed circuit (See Datasheet)", F3 GND (power) "Tie these GND pins to a local ground plane  below the LTM8052/LTM8052A and the circuit components. In most applications, the bulk of the heat flow out  of the LTM8052/LTM8052A is through these pads, so the  printed circuit (See Datasheet)", F4 GND (power) "Tie these GND pins to a local ground plane  below the LTM8052/LTM8052A and the circuit components. In most applications, the bulk of the heat flow out  of the LTM8052/LTM8052A is through these pads, so the  printed circuit (See Datasheet)", F5 GND (power) "Tie these GND pins to a local ground plane  below the LTM8052/LTM8052A and the circuit components. In most applications, the bulk of the heat flow out  of the LTM8052/LTM8052A is through these pads, so the  printed circuit (See Datasheet)", F6 GND (power) "Tie these GND pins to a local ground plane  below the LTM8052/LTM8052A and the circuit components. In most applications, the bulk of the heat flow out  of the LTM8052/LTM8052A is through these pads, so the  printed circuit (See Datasheet)", F7 GND (power) "Tie these GND pins to a local ground plane  below the LTM8052/LTM8052A and the circuit components. In most applications, the bulk of the heat flow out  of the LTM8052/LTM8052A is through these pads, so the  printed circuit (See Datasheet)", G1 GND (power) "Tie these GND pins to a local ground plane  below the LTM8052/LTM8052A and the circuit components. In most applications, the bulk of the heat flow out  of the LTM8052/LTM8052A is through these pads, so the  printed circuit (See Datasheet)", G2 GND (power) "Tie these GND pins to a local ground plane  below the LTM8052/LTM8052A and the circuit components. In most applications, the bulk of the heat flow out  of the LTM8052/LTM8052A is through these pads, so the  printed circuit (See Datasheet)", G3 GND (power) "Tie these GND pins to a local ground plane  below the LTM8052/LTM8052A and the circuit components. In most applications, the bulk of the heat flow out  of the LTM8052/LTM8052A is through these pads, so the  printed circuit (See Datasheet)", G4 GND (power) "Tie these GND pins to a local ground plane  below the LTM8052/LTM8052A and the circuit components. In most applications, the bulk of the heat flow out  of the LTM8052/LTM8052A is through these pads, so the  printed circuit (See Datasheet)", G5 GND (power) "Tie these GND pins to a local ground plane  below the LTM8052/LTM8052A and the circuit components. In most applications, the bulk of the heat flow out  of the LTM8052/LTM8052A is through these pads, so the  printed circuit (See Datasheet)", G6 GND (power) "Tie these GND pins to a local ground plane  below the LTM8052/LTM8052A and the circuit components. In most applications, the bulk of the heat flow out  of the LTM8052/LTM8052A is through these pads, so the  printed circuit (See Datasheet)", G7 GND (power) "Tie these GND pins to a local ground plane  below the LTM8052/LTM8052A and the circuit components. In most applications, the bulk of the heat flow out  of the LTM8052/LTM8052A is through these pads, so the  printed circuit (See Datasheet)", H5 GND (power) "Tie these GND pins to a local ground plane  below the LTM8052/LTM8052A and the circuit components. In most applications, the bulk of the heat flow out  of the LTM8052/LTM8052A is through these pads, so the  printed circuit (See Datasheet)", H6 GND (power) "Tie these GND pins to a local ground plane  below the LTM8052/LTM8052A and the circuit components. In most applications, the bulk of the heat flow out  of the LTM8052/LTM8052A is through these pads, so the  printed circuit (See Datasheet)", H7 GND (power) "Tie these GND pins to a local ground plane  below the LTM8052/LTM8052A and the circuit components. In most applications, the bulk of the heat flow out  of the LTM8052/LTM8052A is through these pads, so the  printed circuit (See Datasheet)", J5 GND (power) "Tie these GND pins to a local ground plane  below the LTM8052/LTM8052A and the circuit components. In most applications, the bulk of the heat flow out  of the LTM8052/LTM8052A is through these pads, so the  printed circuit (See Datasheet)", J6 GND (power) "Tie these GND pins to a local ground plane  below the LTM8052/LTM8052A and the circuit components. In most applications, the bulk of the heat flow out  of the LTM8052/LTM8052A is through these pads, so the  printed circuit (See Datasheet)", J7 GND (power) "Tie these GND pins to a local ground plane  below the LTM8052/LTM8052A and the circuit components. In most applications, the bulk of the heat flow out  of the LTM8052/LTM8052A is through these pads, so the  printed circuit (See Datasheet)", K5 GND (power) "Tie these GND pins to a local ground plane  below the LTM8052/LTM8052A and the circuit components. In most applications, the bulk of the heat flow out  of the LTM8052/LTM8052A is through these pads, so the  printed circuit (See Datasheet)", K6 GND (power) "Tie these GND pins to a local ground plane  below the LTM8052/LTM8052A and the circuit components. In most applications, the bulk of the heat flow out  of the LTM8052/LTM8052A is through these pads, so the  printed circuit (See Datasheet)", K7 GND (power) "Tie these GND pins to a local ground plane  below the LTM8052/LTM8052A and the circuit components. In most applications, the bulk of the heat flow out  of the LTM8052/LTM8052A is through these pads, so the  printed circuit (See Datasheet)", L5 GND (power) "Tie these GND pins to a local ground plane  below the LTM8052/LTM8052A and the circuit components. In most applications, the bulk of the heat flow out  of the LTM8052/LTM8052A is through these pads, so the  printed circuit (See Datasheet)", L8 GND (power) "Tie these GND pins to a local ground plane  below the LTM8052/LTM8052A and the circuit components. In most applications, the bulk of the heat flow out  of the LTM8052/LTM8052A is through these pads, so the  printed circuit (See Datasheet)"

## CMP-1870142-3
designator R?, comment Resistance: 200 Ω  (hidden comment: Generic RES 1206)
Generic RES 1206, =Resistance+'.'+Tolerance+','+Case; Manufacturer Part Number: ERJ-UP8F2000V; Power Rating: 0.25 W; Voltage Rating (DC): 200.0 V; Tolerance: ±1%; Lead-Free Status: Lead Free; RoHS: Compliant; OctopartID: 51e99a6e238c8e2e; Packaging: Tape & Reel (TR); Case: 1206
footprint RESC3216X65X50ML15T25
footprint RESC3216X65X50LL15T25
footprint RESC3216X65X50NL15T25
pins: 1, 2
1 alternate drawing of the same symbol

## CMP-3554908-2
designator C?, comment Capacitance: 10 uF  Voltage Rating (DC): 50.0 V  (hidden comment: Murata GRM31CR61H106KA12L)
Multilayer Ceramic Capacitors MLCC - SMD/SMT 1206 10uF 50volt X5R +/-10%; Manufacturer Part Number: CL31B106KBHNNNE; Capacitance Tolerance: ±10%; Case/Package (SI): 3216; Lead-Free Status: Lead Free; Dielectric Characteristic: X5R; Lifecycle Status: Active; Mounting Style: Surface Mount; Number of Pins: 2; Octopart Url: https://octopart.com/grm31cr61h106ka12l-murata-18903335; OctopartID: fd8535afa9c42242; Packaging: Cut Tape (CT); REACH SVHC Compliance: No SVHC; RoHS: Compliant; Size-Length: 0.0032 m; Size-Thickness: 0.0016 m; Size-Width: 0.0016 m
footprint CAPC3216X180X55ML20T25
footprint CAPC3216X180X55LL20T25
footprint CAPC3216X180X55NL20T25
pins: 1, 2
1 alternate drawing of the same symbol

## CMP-3902036-3
designator R?, comment Resistance: 100 KΩ  (hidden comment: 100 KΩ,±1%,0402)
Generic RES 0402, =Resistance+','+Tolerance+','+Case; Manufacturer Part Number: RT0402FRE07100KL; Lead-Free Status: Lead Free; Voltage: 50.0 V; Power: 0.063 W; Mounting Style: Surface Mount; RoHS: Compliant; Number of Pins: 2; Tolerance: ±1%; Octopart Url: TBD; Case: 0402; OctopartID: 26dced8948c2f91b
footprint RESC1005X40X25ML05T05
footprint RESC1005X40X25NL05T05
footprint RESC1005X40X25LL05T05
pins: 1, 2
1 alternate drawing of the same symbol

## CMP-7473528-5
designator C?, comment Capacitance: 1.00 µF  (hidden comment: Samsung CL10B105KA8NNNC)
CL Series 0603 1 uF 25 V ±10 % X7R Surface Mount Multilayer Ceramic Capacitor; Manufacturer Part Number: UMK107AB7105KA-T; Lead-Free Status: Lead Free; Capacitance Tolerance: ±10%; Voltage Rating (DC): 25.0 V; RoHS: Compliant; Mounting Style: Surface Mount; Footprint: PCB-0002-00062-3; Octopart URL: http://octopart.com/cl10b105ka8nnnc-samsung-19831597; Case/Package: 0603; OctopartID: ce7a065e703111bd; Dielectric Characteristic: X7R
footprint CAPC1608X90X35ML15T15
footprint CAPC1608X90X35NL15T15
footprint CAPC1608X90X35LL15T15
pins: 1, 2

## CMP-7473528-7
designator C?, comment Capacitance: 2.2 µF  (hidden comment: 2.2 µF,±10%,25V,X7R,0603)
Generic CAP 0603, =Capacitance+','+Tolerance+','+Voltage+','+Dielectric; Manufacturer Part Number: GRM188Z71E225KE43D; Lead-Free Status: Lead Free; RoHS: Compliant; Voltage: 25V; Footprint: PCB-0002-00062-3; Dielectric: X7R; Tolerance: ±10%; OctopartID: ce7a065e703111bd; Mounting Style: Surface Mount; Octopart URL: TBD; Case: 0603
footprint CAPC1608X90X35ML15T15
footprint CAPC1608X90X35NL15T15
footprint CAPC1608X90X35LL15T15
pins: 1, 2

## CMP-12518857-12
designator D?, comment Würth Elektronik 150060GS75000  Manufacturer Part Number: 150060GS75000
Led, Green, 520 Nm, 3.2 V, 30 Ma, 430 Mcd Rohs Compliant: Yes; Footprint: PCC-0029-00260-1
footprint PCB-5fu3j7c0qqekthrt71i6-1
pins: 1 K, 2 A

## CMP-12518863-13
designator D?, comment Würth Elektronik 150060YS75000
Led, Yellow, 590 Nm, 2 V, 30 Ma, 120 Mcd Rohs Compliant: Yes; Forward Voltage: 2.00 V; Viewing Angle: 140 °; Luminous Intensity: 120 mcd; RoHS: Compliant; Footprint: PCB-rxfjlzgnb1funqct5a9u-1; OctopartID: fe0f36c1264421c8; REACH SVHC Compliance: No SVHC; Manufacturer Part Number: 150060YS75000; Octopart URL: https://octopart.com/150060ys75000-w%C3%BCrth+elektronik-29687085; Case/Package: 0603; Color: Yellow; Packaging: Tape & Reel (TR); Mounting Style: Surface Mount
footprint PCB-zc2vv3u4p0giaiwimi3e-1 (AVAG-HSMX-C190)
pins: 1 K, 2 A

## CMP-19354130-5
designator U?, comment TI SN74LVC1G14DBVR
IC SCHMITT TRIG INV SOT-23-5; Lead-Free Status: Lead Free; Propagation Delay Max (tpd): 5e-09 s; Output Current: 0.032 A; Number of Bits: 1; Supply Voltage (DC): 5.0 V; Output Current Drive: -0.001 A; REACH SVHC Compliance: No SVHC; OctopartID: 3234fb390160edf3; RoHS: Compliant; Manufacturer Part Number: SN74LVC1G14DBVR; Footprint: PCC-0151-00548-1; Octopart Url: https://octopart.com/sn74lvc1g14dbvr-texas+instruments-464434; Number of Pins: 5; Mounting Style: Surface Mount; Number of Circuits: 1; Number of Gates: 1; Lifecycle Status: Active; Case/Package: SOT-23
footprint TI-DBV5_M (SOT23, 5-Leads, Body 2.9x1.6mm, Pitch 0.95mm, IPC Low Density)
footprint TI-DBV5_L (SOT23, 5-Leads, Body 2.9x1.6mm, Pitch 0.95mm, IPC High Density)
footprint TI-DBV5_N (SOT23, 5-Leads, Body 2.9x1.6mm, Pitch 0.95mm, IPC Medium Density)
pins: 2 A (in), 3 (power), 4 Y (out), 5 (power) "3.3V"

## CMP-19361507-3
designator U?, comment Texas Instruments TXS0102DCTT
Voltage Level Translator 2-CH Bidirectional 8-Pin SSOP T/R; Number of Bits: 2; Output Current: 1.00 mA; Supply Voltage (DC): 3.60 V (max), 1.65 V (min); Lead-Free Status: Lead Free; Octopart URL: https://octopart.com/txs0102dctt-texas+instruments-7512181; Footprint: PCB-19361507-1; Lifecycle Status: Active; Operating Temperature: -40.0 °C to 85.0 °C; Packaging: Cut Tape (CT), Tape & Reel (TR); OctopartID: bfd576ad3ac66012; RoHS: Compliant; REACH SVHC Compliance: No SVHC; Manufacturer Part Number: TXS0102DCTT; Case/Package: SSOP; Number of Pins: 8
footprint PCB-19361507-1 (Footprint - TI (Texas Instruments) TXS0102DCTT)
pins: 1 B2, 2 GND, 3 VCCA, 4 A2, 5 A1, 6 OE, 7 VCCB, 8 B1

## CMP-147564696-2
designator RL?, comment Coto C241S
Coto Mosfet - 1 Form A, 5A, 20V Max/ Tape-Reel; OctopartID: 147564696; Manufacturer Part Number: C241S; Octopart Url: https://octopart.com/c241s-coto-147564696
footprint PCB-o1m8470la7x8r6xoffbd-1
pins: 1 A, 2 K, 3 S, 4 D

## CMP-450589207bdc9ac2-1
designator U?, comment Texas Instruments REF3425IDBVR
2.5-V low-drift low-power small-footprint series voltage reference 6-SOT-23 -40 to 125; Temperature Coefficient: 2.50 ppm/°C; Quiescent Current: 72.0 µA; Packaging: Cut Tape (CT); Octopart URL: https://octopart.com/ref3425idbvr-texas+instruments-86973375; RoHS: Compliant; Lifecycle Status: Pre-Release; Case/Package: SOT-23; OctopartID: 450589207bdc9ac2; Number of Pins: 6; Manufacturer Part Number: REF3425IDBVR; Footprint: PCB-iii9p4hirjo0din0ylk5-1; Operating Temperature: -40.0 °C (min)
footprint PCB-iii9p4hirjo0din0ylk5-1 (Footprint - Texas Instruments REF3425IDBVR)
pins: 1 GND_F (power), 2 GND_S (power), 3 EN (in), 4 IN (power), 5 OUT_S (out), 6 OUT_F (out)

## CMP-b48f7df16db76b48-3
designator TP?, comment Molex 90120-0761
2.54mm (.100") Pitch C-Grid III Header, Single Row, Vertical, 40 Circuits, Gold (Au) Plating; Gender: Male; Current Rating: 3.00 A; Number of Contacts: 1; Glow Wire Compliant: Non-Compliant; Number of Circuits: 40; Halogen Free Status: Not Reviewed; Manufacturer Part Number: 90120-0761; Lifecycle Status: Not Listed by Manufacturer; Contact Material: Brass; OctopartID: b48f7df16db76b48; Orientation: Vertical; RoHS: Compliant; Mounting Style: Through Hole, Vertical; Footprint: PCB-u1j2a009byds4mriae4x-1; Number of Rows: 1; Contact Plating: Gold; Octopart URL: http://octopart.com/90120-0761-molex-7666782
footprint PCB-u1j2a009byds4mriae4x-1 (Footprint - Molex 90120-0761)
pins: 1

## CMP-bf2276a55d9a60e5-19
designator C?, comment Capacitance: 100 nF  (hidden comment: Samsung CL05B104KO5NNNC)
Ceramic capacitor SMD-0402 100nF /16V X7R# K +-10%, Samsung, RoHS; Dielectric Characteristic: X7R; Lead-Free Status: Lead Free; Voltage Rating (DC): 16.0 V; Capacitance Tolerance: ±10%; Mounting Style: Surface Mount; Case/Package: 0402; OctopartID: 0755ced2c795d892; Footprint: PCB-0002-00476-3; Octopart URL: https://octopart.com/cl05b104ko5nnnc-samsung-9299366; RoHS: Compliant; Manufacturer Part Number: CL05B104KO5NNNC
footprint CAPC1005X56X25NL10T15
footprint CAPC1005X56X25ML10T15
simulation model SIM-glhfr9kivr1d91oqkule-1 (Sim Model - Samsung CL05B104KO5NNNC)
footprint CAPC1005X56X25LL10T15
pins: 1, 2

## CMP-bf2276a55d9a60e5-20
designator C?, comment Capacitance: 10 nF  (hidden comment: 10 nF,±10%,25V,CGO,0402)
Generic CAP 0402, =Capacitance+','+Tolerance+','+Voltage+','+Dielectric+','+Case; Manufacturer Part Number: GRM1555C1E103JE01J; Lead-Free Status: Lead Free; Octopart URL: TBD; Case: 0402; OctopartID: 0755ced2c795d892; Voltage: 25V; Dielectric: CGO; RoHS: Compliant; Mounting Style: Surface Mount; Tolerance: ±10%; Footprint: PCB-0002-00476-3
footprint CAPC1005X56X25NL10T15
footprint CAPC1005X56X25ML10T15
footprint CAPC1005X56X25LL10T15
pins: 1, 2